# Altium footprint library PcbLib1.PcbLib: 26 footprints (part 1 of 2)
Each footprint in its own frame and in the unit in brackets; x right, y up, seen from the top. Pads: shape width x height; smd on the part's side, far side on the other; paste and mask are expansions set on the pad; w line width, h text height; cw(c..) or ccw(c..) is an arc to the next point about the centre after c.
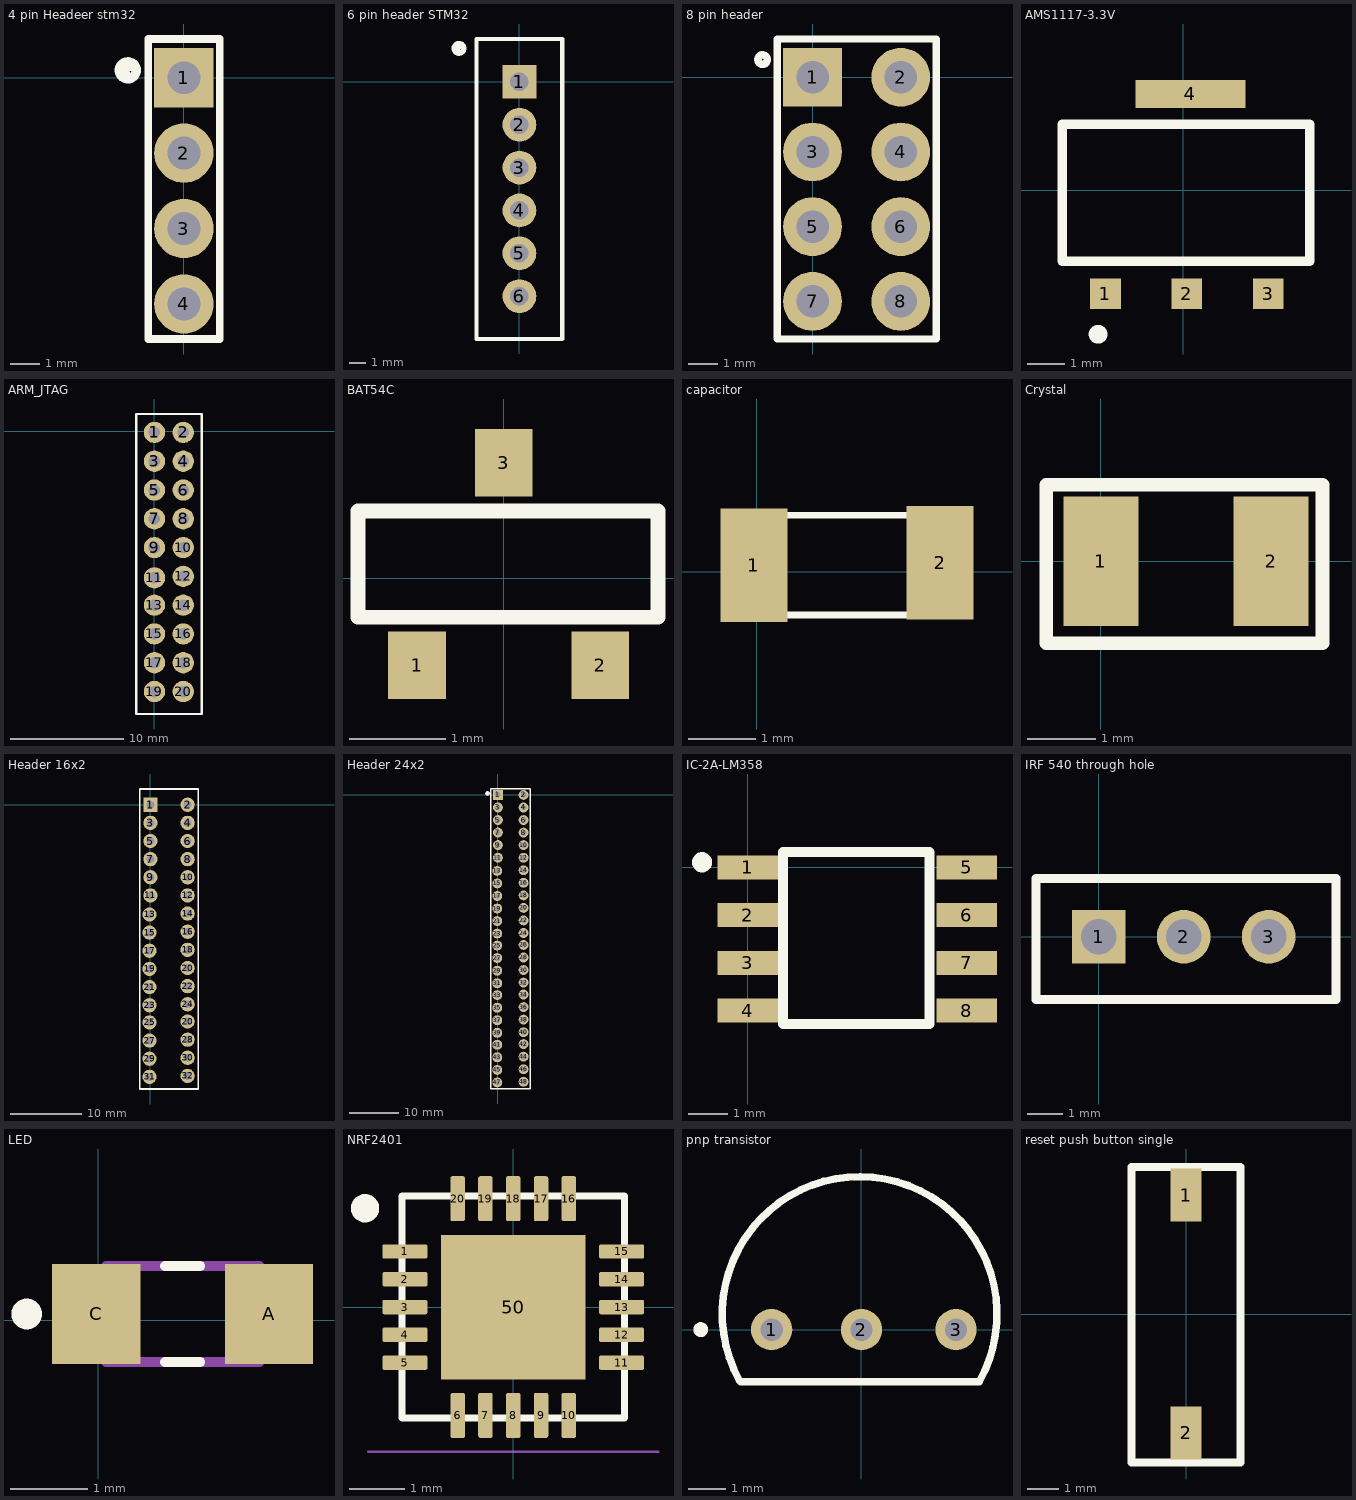
[diagram p0: the footprints below, top view; thin cyan lines are the x and y axes]

## 4 pin Headeer stm32 [mm]
pads (4):
  rect 2x2 hole 1.1: 1(0,0)
  round 2 hole 1.1: 2(0,-2.54) 3(0,-5.08) 4(0,-7.62)
Top Overlay:
  circle w0.254: c-1.8,0.2 r0.159
  circle w0.254: c-1.89,0.245 r0.315
  lines w0.254: -1.2,-8.8 1.2,-8.8 1.2,1.3 -1.2,1.3 -1.2,-8.8

## 6 pin header STM32 [mm]
pads (6):
  rect 2x2 hole 1.1: 1(0,0)
  round 2 hole 1.1: 2(0,-2.54) 3(0,-5.08) 4(0,-7.62) 5(0,-10.16) 6(0,-12.7)
Top Overlay:
  circle w0.254: c-3.492,1.937 r0.159
  circle w0.254: c-3.582,1.982 r0.315
  lines w0.254: -2.54,-15.24 2.54,-15.24 2.54,2.54 -2.54,2.54 -2.54,-15.24

## 8 pin header [mm]
pads (8):
  rect 2x2 hole 1.1: 1(0,0)
  round 2 hole 1.1: 2(3,0) 3(0,-2.54) 4(3,-2.54) 5(0,-5.08) 6(3,-5.08) 7(0,-7.62) 8(3,-7.62)
Top Overlay:
  circle w0.254: c-1.7,0.6 r0.159
  lines w0.254: -1.2,-8.9 4.2,-8.9 4.2,1.3 -1.2,1.3 -1.2,-8.9

## AMS1117-3.3V [mm]
pads (4):
  rect 0.83x0.83 smd paste-2539.97 mask-2539.97: 1(-2.1,-2.8) 2(0.1,-2.8) 3(2.3,-2.8)
  rect 2.97x0.762 smd paste-2539.97 mask-2539.97: 4(0.2,2.6)
Top Overlay:
  circle w0.254: c-2.3,-3.9 r0.127
  lines w0.254: -3.271,-1.922 3.429,-1.922 3.429,1.778 -3.271,1.778 -3.271,-1.922
Top Paste:
  region: -2.515,-3.215 -2.515,-2.385 -1.685,-2.385 -1.685,-3.215
  region: -0.315,-3.215 -0.315,-2.385 0.515,-2.385 0.515,-3.215
  region: 1.885,-3.215 1.885,-2.385 2.715,-2.385 2.715,-3.215
  region: -1.285,2.219 -1.285,2.981 1.685,2.981 1.685,2.219
Top Solder:
  region: -2.565,-3.562 -2.565,-2.038 -1.635,-2.038 -1.635,-3.562
  region: -0.365,-3.562 -0.365,-2.038 0.565,-2.038 0.565,-3.562
  region: 1.835,-3.562 1.835,-2.038 2.765,-2.038 2.765,-3.562
  region: -1.785,1.85 -1.785,3.35 2.185,3.35 2.185,1.85

## ARM_JTAG [mil]
pads (20):
  round 74 hole 40: 1(0,-5) 2(100,-5) 3(0,-105) 4(100,-105) 5(0,-205) 6(100,-205) 7(0,-305) 8(100,-305) 9(0,-405) 10(100,-405) 11(0,-510) 12(100,-505) 13(0,-605) 14(100,-605) 15(0,-705) 16(100,-705) 17(0,-805) 18(100,-805) 19(0,-905) 20(100,-905)
Top Overlay:
  lines w7.87: -62.99,-983.07 -63.24,-983.08 75.59,-983.07 164.17,-983.07
  lines w8: -62.99,-983.07 -62.99,59.06 -6.2,59.06 107.38,59.06 164.17,59.06 164.17,-201.48 164.17,-722.54 164.17,-983.07
Mechanical 13:
  region: 10,-615 -10,-615 -10,-595 10,-595
  region: 110,-915 90,-915 90,-895 110,-895
  region: 10,-915 -10,-915 -10,-895 10,-895
  region: 110,-815 90,-815 90,-795 110,-795
  region: 10,-815 -10,-815 -10,-795 10,-795
  region: 10,-815 -10,-815 -10,-795 10,-795
  region: 110,-815 90,-815 90,-795 110,-795
  region: 110,-715 90,-715 90,-695 110,-695
  region: 10,-715 -10,-715 -10,-695 10,-695
  region: 110,-515 90,-515 90,-495 110,-495
  region: 110,-615 90,-615 90,-595 110,-595
  region: 10,-15 -10,-15 -10,5 10,5
  region: 10,-115 -10,-115 -10,-95 10,-95
  region: 110,-415 90,-415 90,-395 110,-395
  region: 10,-415 -10,-415 -10,-395 10,-395
  region: 110,-315 90,-315 90,-295 110,-295
  region: 10,-315 -10,-315 -10,-295 10,-295
  region: 10,-315 -10,-315 -10,-295 10,-295
  region: 110,-315 90,-315 90,-295 110,-295
  region: 110,-215 90,-215 90,-195 110,-195
  region: 10,-215 -10,-215 -10,-195 10,-195
  region: 110,-15 90,-15 90,5 110,5
  region: 110,-115 90,-115 90,-95 110,-95

## BAT54C [mm]
pads (3):
  rect 0.6x0.7 smd paste+0 mask+0.102: 1(-0.9,-0.9) 2(1,-0.9) 3(0,1.2)
Top Overlay:
  lines w0.152: -1.512,-0.401 -0.726,-0.401 0.846,-0.401 1.6,-0.401 1.6,0.7 -1.512,0.7 -1.512,-0.393

## capacitor [mm]
pads (2):
  rect 1x1.7 smd paste-2539.97 mask-2539.97: 1(-0.042,0.098) 2(2.738,0.136)
Top Overlay:
  lines w0.1: -0.446,-0.646 3.146,-0.646 3.146,0.846 -0.446,0.846 -0.446,-0.646
Top Paste:
  region: 2.238,-0.714 2.238,0.986 3.238,0.986 3.238,-0.714
  region: -0.542,-0.752 -0.542,0.948 0.458,0.948 0.458,-0.752
Top Solder:
  region: 2.238,-0.714 2.238,0.986 3.238,0.986 3.238,-0.714
  region: -0.542,-0.752 -0.542,0.948 0.458,0.948 0.458,-0.752

## Crystal [mm]
pads (2):
  rect 1.1x1.9 smd paste-2539.97 mask-2539.97: 1(0,0) 2(2.5,0)
Top Overlay:
  lines w0.2: -0.8,-1.2 -0.8,1.121 3.253,1.121 3.253,-1.2 -0.8,-1.2
Top Paste:
  region: 1.95,-0.95 1.95,0.95 3.05,0.95 3.05,-0.95
  region: -0.55,-0.95 -0.55,0.95 0.55,0.95 0.55,-0.95
Top Solder:
  region: 1.9,-1 1.9,1 3.1,1 3.1,-1
  region: -0.6,-1 -0.6,1 0.6,1 0.6,-1

## Header 16x2 [mm]
pads (32):
  rect 2x2 hole 1.1: 1(0,0)
  round 2 hole 1.1: 2(5.207,0) 3(0,-2.54) 4(5.207,-2.54) 5(0,-5.08) 6(5.207,-5.08) 7(0,-7.62) 8(5.207,-7.62) 9(0,-10.16) 10(5.207,-10.16) 11(0,-12.7) 12(5.207,-12.7) 13(-0.127,-15.367) 14(5.207,-15.24) 15(-0.127,-17.907) 16(5.207,-17.78) 17(-0.127,-20.447) 18(5.207,-20.32) 19(-0.127,-22.987) 20(5.207,-30.353) 20(5.207,-22.86) 21(-0.127,-25.527) 22(5.207,-25.4) 23(-0.127,-28.067) 24(5.207,-27.94) 25(-0.127,-30.48) 27(-0.127,-33.02) 28(5.207,-32.893) 29(-0.127,-35.56) 30(5.207,-35.433) 31(-0.127,-38.1) 32(5.207,-37.973)
Top Overlay:
  lines w0.254: -1.5,-39.8 6.7,-39.8 6.7,2.2 -1.5,2.2 -1.5,-39.8

## Header 24x2 [mm]
pads (48):
  rect 2x2 hole 1.1: 1(0,0)
  round 2 hole 1.1: 2(5.207,0) 3(0,-2.54) 4(5.207,-2.54) 5(0,-5.08) 6(5.207,-5.08) 7(0,-7.62) 8(5.207,-7.62) 9(0,-10.16) 10(5.207,-10.16) 11(0,-12.7) 12(5.207,-12.7) 13(-0.127,-15.367) 14(5.207,-15.24) 15(-0.127,-17.907) 16(5.207,-17.78) 17(-0.127,-20.447) 18(5.207,-20.32) 19(-0.127,-22.987) 20(5.207,-22.86) 21(-0.127,-25.527) 22(5.207,-25.4) 23(-0.127,-28.067) 24(5.207,-27.94) 25(-0.127,-30.48) 26(5.207,-30.353) 27(-0.127,-33.02) 28(5.207,-32.893) 29(-0.127,-35.56) 30(5.207,-35.433) 31(-0.127,-38.1) 32(5.207,-37.973) 33(-0.127,-40.513) 34(5.207,-40.386) 35(-0.127,-43.053) 36(5.207,-42.926) 37(-0.127,-45.593) 38(5.207,-45.466) 39(-0.127,-48.133) 40(5.207,-48.006) 41(-0.127,-50.546) 42(5.207,-50.419) 43(-0.127,-53.086) 44(5.207,-52.959) 45(-0.127,-55.626) 46(5.207,-55.499) 47(-0.127,-58.166) 48(5.207,-58.039)
Top Overlay:
  circle w0.254: c-2.1,0.3 r0.159
  circle w0.254: c-2.1,0.3 r0.315
  lines w0.254: -1.4,-59.5 6.5,-59.5 6.5,1.2 -1.4,1.2 -1.4,-59.5

## IC-2A-LM358 [mm]
pads (8):
  rect 1.52x0.6 smd paste-2539.97 mask-2539.97: 1(0,0) 2(0,-1.2) 3(0,-2.4) 4(0,-3.6) 5(5.5,0) 6(5.5,-1.2) 7(5.5,-2.4) 8(5.5,-3.6)
Top Overlay:
  circle w0.254: c-1.143,0.127 r0.127
  lines w0.254: 0.889,-3.937 4.572,-3.937 4.572,0.381 0.889,0.381 0.889,-3.937
Top Paste:
  region: -0.762,-0.3 -0.762,0.3 0.762,0.3 0.762,-0.3
  region: -0.762,-1.5 -0.762,-0.9 0.762,-0.9 0.762,-1.5
  region: -0.762,-2.7 -0.762,-2.1 0.762,-2.1 0.762,-2.7
  region: -0.762,-3.9 -0.762,-3.3 0.762,-3.3 0.762,-3.9
  region: 4.738,-0.3 4.738,0.3 6.262,0.3 6.262,-0.3
  region: 4.738,-1.5 4.738,-0.9 6.262,-0.9 6.262,-1.5
  region: 4.738,-2.7 4.738,-2.1 6.262,-2.1 6.262,-2.7
  region: 4.738,-3.9 4.738,-3.3 6.262,-3.3 6.262,-3.9
Top Solder:
  region: -0.762,-0.3 -0.762,0.3 0.762,0.3 0.762,-0.3
  region: -0.762,-1.5 -0.762,-0.9 0.762,-0.9 0.762,-1.5
  region: -0.762,-2.7 -0.762,-2.1 0.762,-2.1 0.762,-2.7
  region: -0.762,-3.9 -0.762,-3.3 0.762,-3.3 0.762,-3.9
  region: 4.738,-0.3 4.738,0.3 6.262,0.3 6.262,-0.3
  region: 4.738,-1.5 4.738,-0.9 6.262,-0.9 6.262,-1.5
  region: 4.738,-2.7 4.738,-2.1 6.262,-2.1 6.262,-2.7
  region: 4.738,-3.9 4.738,-3.3 6.262,-3.3 6.262,-3.9

## IRF 540 through hole [mil]
pads (3):
  rect 60x60 hole 39.37: 1(0,0)
  round 60 hole 39.37: 2(94.88,0) 3(189.76,0)
Top Overlay:
  lines w10: 90,65 245,65 265,65 265,-70 -70,-70 -70,65 95,65

## LED [mm]
pads (2):
  rect 1.15x1.3 smd: A(2.223,0.079) C(-0.027,0.079)
Top Overlay:
  circle w0.2: c-0.934,0.079 r0.1
  lines w0.127: 0.868,-0.546 1.328,-0.546 ; 0.868,0.704 1.328,0.704
Mechanical 13:
  lines w0.127: 0.098,-0.546 0.098,0.704 2.098,0.704 2.098,-0.546 0.098,-0.546

## NRF2401 [mm]
pads (21):
  rrect25% 0.81x0.26 smd: 1(-1.95,1) 2(-1.95,0.5) 3(-1.95,0) 4(-1.95,-0.5) 5(-1.95,-1) 11(1.95,-1) 12(1.95,-0.5) 13(1.95,0) 14(1.95,0.5) 15(1.95,1)
  rrect25% 0.26x0.81 smd: 6(-1,-1.95) 7(-0.5,-1.95) 8(0,-1.95) 9(0.5,-1.95) 10(1,-1.95) 16(1,1.95) 17(0.5,1.95) 18(0,1.95) 19(-0.5,1.95) 20(-1,1.95)
  rect 2.6x2.6 smd paste-2: 50(0,0)
Top Overlay:
  circle w0.254: c-2.667,1.778 r0.127
  lines w0.127: -2,-1.65 -2,-2 ; -2,1.65 -2,2 ; -1.65,-2 -2,-2 ; -1.65,2 -2,2 ; 1.65,-2 2,-2 ; 1.65,2 2,2 ; 2,-1.65 2,-2 ; 2,1.65 2,2 ; -2,-2 2,-2 ; -2,-2 -2,2 ; -2,2 2,2 ; 2,-2 2,-1 2,1 2,2
Top Paste:
  region: 0.98,0.16 0.16,0.16 0.16,0.98 0.98,0.98
  region: -0.16,0.16 -0.981,0.16 -0.981,0.98 -0.16,0.98
  region: -0.16,-0.98 -0.98,-0.98 -0.98,-0.16 -0.16,-0.16
  region: 0.98,-0.98 0.16,-0.98 0.16,-0.16 0.98,-0.16
Mechanical 15:
  lines w0.05: -2.605,-2.605 2.605,-2.605

## pnp transistor [mm]
pads (3):
  round 1.108 hole 0.6 mask+0.102: 1(-2.413,0) 2(0,0) 3(2.54,0)
Top Overlay:
  circle w0.2: c-4.318,0 r0.1
  lines w0.127: 2.289,-0.17 2.291,-0.17
  lines w0.2: -3.28,-1.364 cw(c-0.05,0.421) 3.161,-1.397 -3.247,-1.397 -3.28,-1.364

## reset push button single [mm]
pads (2):
  rect 1x1.7 smd paste-2539.97 mask-2539.97: 1(0,3.825) 2(0,-3.825)
Top Overlay:
  lines w0.254: -1.75,-4.775 1.75,-4.775 1.75,4.725 -1.75,4.725 -1.75,-4.775
Top Paste:
  region: -0.5,2.975 -0.5,4.675 0.5,4.675 0.5,2.975
  region: -0.5,-4.675 -0.5,-2.975 0.5,-2.975 0.5,-4.675
Top Solder:
  region: -0.6,2.825 -0.6,4.825 0.6,4.825 0.6,2.825
  region: -0.6,-4.825 -0.6,-2.825 0.6,-2.825 0.6,-4.825